# Altium schematic symbol library ECS-320-10-48B-CKY-TR.SchLib: 1 symbol
Pins are listed as number, name and electrical type; pins without a type are passive.

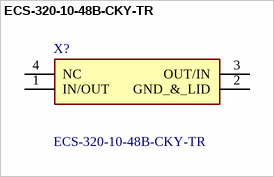
[diagram p0: symbol ECS-320-10-48B-CKY-TR]

## ECS-320-10-48B-CKY-TR
designator X?
Crystals CRYSTAL 32.000MHZ ECX-1048B +/-10ppm +/-10ppm 10pF 150 Ohm Fundamental -30 C 85 C Surface Mount 4-SMD, No Lead W 1.20mm x 1.00mm) (0.33mm); Manufacturer_Name: ECS; Mouser Part Number: 520-S3201048BCKYTR; Mouser Price/Stock: https://www.mouser.co.uk/ProductDetail/ECS/ECS-320-10-48B-CKY-TR?qs=zW32dvEIR3umcnJFx9fznA%3D%3D; Manufacturer_Part_Number: ECS-320-10-48B-CKY-TR; Datasheet Link: *; Geometry.Height: 0.33mm
footprint ECS3201048BCKYTR
pins: 1 IN/OUT, 2 GND_&_LID, 3 OUT/IN, 4 NC